# Altium footprint library SON40P220X200X80-11N.PcbLib: 1 footprints
Each footprint in its own frame and in the unit in brackets; x right, y up, seen from the top. Pads: shape width x height; smd on the part's side, far side on the other; paste and mask are expansions set on the pad; w line width, h text height; cw(c..) or ccw(c..) is an arc to the next point about the centre after c.
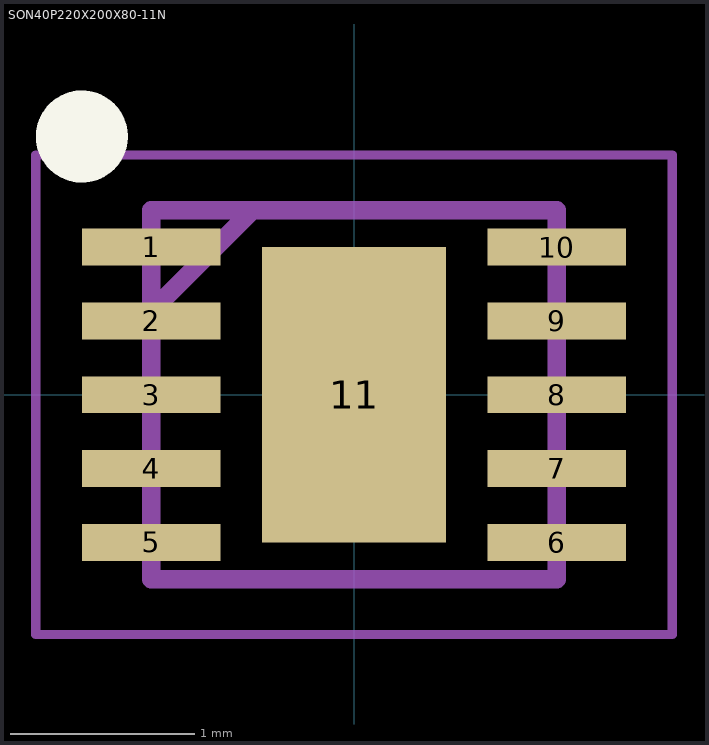
[diagram p0: the footprint, top view; thin cyan lines are the x and y axes]

## SON40P220X200X80-11N [mm]
pads (11):
  rect 0.75x0.2 smd: 1(-1.1,0.8) 2(-1.1,0.4) 3(-1.1,0) 4(-1.1,-0.4) 5(-1.1,-0.8) 6(1.1,-0.8) 7(1.1,-0.4) 8(1.1,0) 9(1.1,0.4) 10(1.1,0.8)
  rect 1x1.6 smd: 11(0,0)
Top Overlay:
  circle w0.25: c-1.475,1.4 r0.125
Mechanical 15:
  lines w0.1: -1.1,0.45 -0.55,1 ; -1.1,-1 1.1,-1 1.1,1 -1.1,1 -1.1,-1
Mechanical 20:
  lines w0.05: -1.725,-1.3 1.725,-1.3 1.725,1.3 -1.725,1.3 -1.725,-1.3